# Altium integrated library 36503205S.IntLib: 1 symbol
Pins are listed as number, name and electrical type; pins without a type are passive.

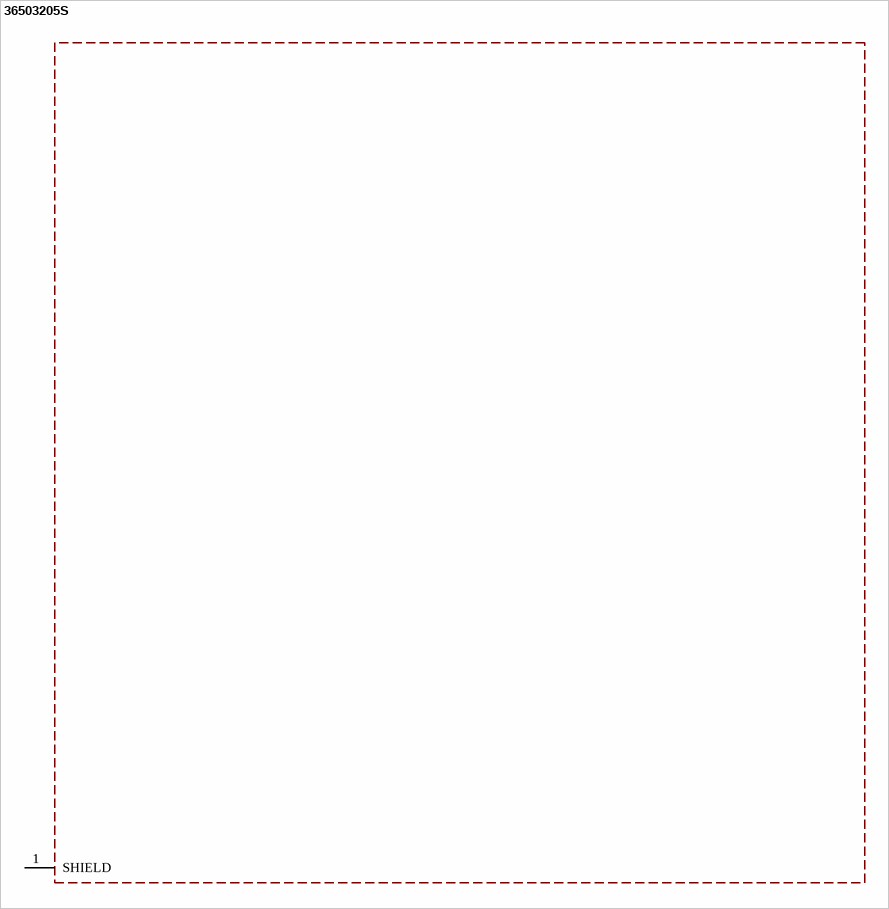
[diagram p0: symbol 36503205S]

## 36503205S
designator U?  (value not drawn)
Manufacturer_Name: Wurth Elektronik; Geometry.Height: 3mm; Manufacturer_Part_Number: 36503205S; Mouser Part Number: 710-36503205S; Mouser Price/Stock: https://www.mouser.co.uk/ProductDetail/Wurth-Elektronik/36503205S?qs=f9yNj16SXrI2DSLNsc02Mg%3D%3D; Arrow Part Number: *; Arrow Price/Stock: *; Datasheet Link: https://www.we-online.com/catalog/datasheet/36503205S.pdf
footprint 36503205S
pins: 1 SHIELD